# Altium footprint library MODULE_TP4056_MICRO-USB_CHARGER_-_1A.PcbLib: 1 footprints
Each footprint in its own frame and in the unit in brackets; x right, y up, seen from the top. Pads: shape width x height; smd on the part's side, far side on the other; paste and mask are expansions set on the pad; w line width, h text height; cw(c..) or ccw(c..) is an arc to the next point about the centre after c.
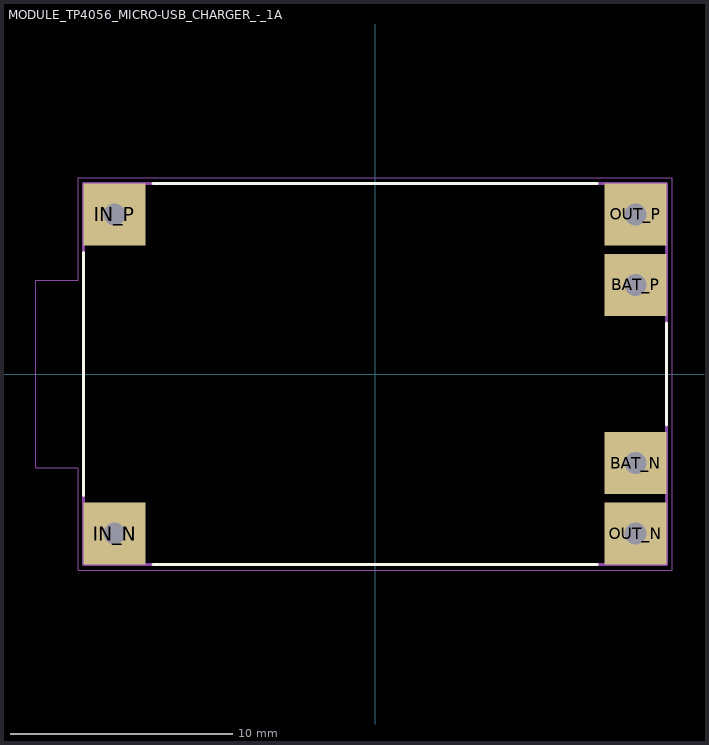
[diagram p0: the footprint, top view; thin cyan lines are the x and y axes]

## MODULE_TP4056_MICRO-USB_CHARGER_-_1A [mm]
height 3.562
pads (6):
  rect 2.79x2.79 / inner round 2.79 / far side rect 2.79x2.79 hole 1 mask+0.102: BAT_N(11.725,-4.01) BAT_P(11.725,4.01) IN_N(-11.725,-7.18) IN_P(-11.725,7.18) OUT_N(11.725,-7.18) OUT_P(11.725,7.18)
Top Overlay:
  lines w0.127: -13.12,-5.465 -13.12,5.465 ; -10,-8.575 10,-8.575 ; -10,8.575 10,8.575 ; 13.12,-2.295 13.12,2.295
Assembly Top:
  lines w0.127: -13.12,-8.575 13.12,-8.575 13.12,8.575 -13.12,8.575 -13.12,-8.575
  text "IN_P" at -9.5,6.5 h1.27
  text "IN_N" at -9.5,-8 h1.27
  text "OUT_P" at 3.75,6.5 h1.27
  text "BAT_P" at 3.75,3.5 h1.27
  text "BAT_N" at 3.75,-4.5 h1.27
  text "OUT_N" at 3.75,-7.75 h1.27
Courtyard Top:
  lines w0.05: -15.272,-4.222 -15.272,4.222 -13.37,4.222 -13.37,8.825 13.37,8.825 13.37,-8.825 -13.37,-8.825 -13.37,-4.222 -15.272,-4.222